# EAGLE library part TFPUSH (library pixel)
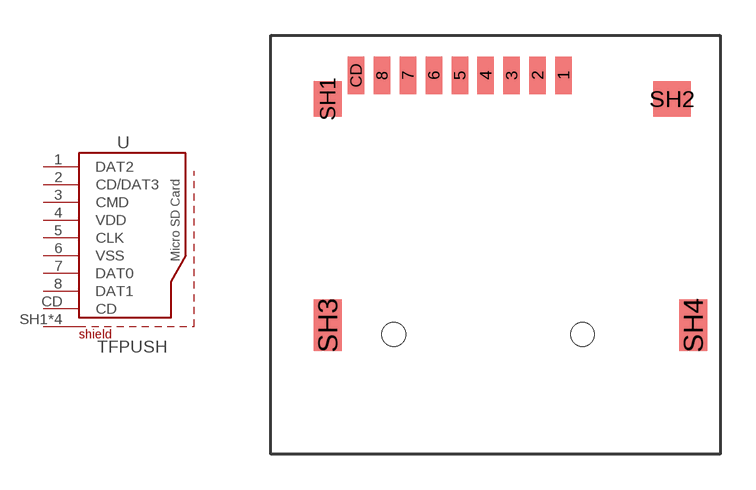
[diagram p39: symbol with the pads of TFPUSH; footprint TFPUSH]

Designator prefix -

## TFPUSH  [TFPUSH]
1  DAT2
2  CD/DAT3
3  CMD
4  VDD
5  CLK
6  VSS
7  DAT0
8  DAT1
CD  CD
SH1  SHIELD
SH2  SHIELD
SH3  SHIELD
SH4  SHIELD

## Footprint TFPUSH (pad centres in mm)
smd 0.7 x 1.6: 1 2.25,11; 2 1.15,11; 3 0.05,11; 4 -1.05,11; 5 -2.15,11; 6 -3.25,11; 7 -4.35,11; 8 -5.45,11; CD -6.55,11
smd 1.2 x 1.5: SH1 -7.75,10
smd 1.6 x 1.5: SH2 6.85,10
smd 1.2 x 2.2: SH3 -7.75,0.4; SH4 7.75,0.4
hole 1 at -4.95,0
hole 1 at 3.05,0